# Altium schematic symbol library Inductors.SchLib: 6 symbols
Pins are listed as number, name and electrical type; pins without a type are passive.

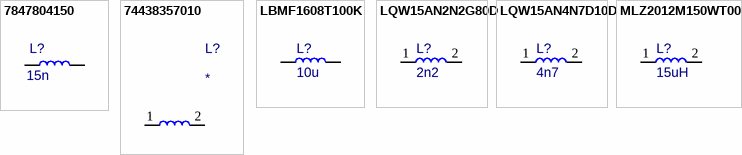
[diagram p0: symbols 7847804150 to MLZ2012M150WT000]

## 7847804150
designator L?, comment 15n
0402, 300mA, RF Inductors - SMD WE-MCI 15nH 5% 0.46Ohms Q-Factor=8 AEC-Q200; Manufacturer_Name: Wurth Elektronik; Manufacturer_Part_Number: 7847804150; ComponentLink1Description: Datasheet; ComponentLink1URL: https://www.we-online.com/components/products/datasheet/7847804150.pdf
footprint 7847804150 (Wuerth 0402 RF Inductors - SMD WE-MCI 15nH 0.46Ohms Q-Factor=8 AEC-Q200)
pins: 1, 2

## 74438357010
designator L?
Power Inductors - SMD WE-MAPI 1uH 7.4A DCR=13.5mOhms AEC-Q200; Manufacturer_Name: Wurth Elektronik; Manufacturer_Part_Number: 74438357010; Description: WE-MAPI SMT Power Inductor Size 4030; L = 1 H +/-20%; IR = 10.25 A; Isat = 12.5 A; RDC = 13.5 m; Datasheet Link: https://www.we-online.com/catalog/datasheet/74438357010.pdf; Height: 3.1mm; Mouser Part Number: 710-74438357010; Mouser Price/Stock: https://www.mouser.co.uk/ProductDetail/Wurth-Elektronik/74438357010?qs=AQlKX63v8RstGPuQmrueWg%3D%3D; Arrow Part Number: 74438357010; Arrow Price/Stock: null?utm_currency=USD&region=asia
footprint 74438357010 (Power Inductors - SMD WE-MAPI 1uH 7.4A DCR=13.5mOhms AEC-Q200)
pins: 1, 2

## LBMF1608T100K
designator L?, comment 10u
Power inductor  0603 10uH 468mOhmsTol 80mA; Manufacturer_Name: Taiyo Yuden; Manufacturer_Part_Number: LBMF1608T100K; Datasheet Link: https://www.mouser.de/datasheet/2/396/wound01_e-1509533.pdf; Height: 0.8; Mouser Part Number: 963-LBMF1608T100K; Mouser Price/Stock: https://www.mouser.co.uk/ProductDetail/Murata-Electronics/LQW15AN2N2G80D?qs=QzBtWTOodeXwqmhCVrS0ZQ%3D%3D; Arrow Part Number: LQW15AN2N2G80D; Arrow Price/Stock: https://www.arrow.com/en/products/lqw15an2n2g80d/murata-manufacturing
footprint LBMF1608T100K (TAIYO YUDEN 0603 footprint for power inductors)
pins: 1, 2

## LQW15AN2N2G80D
designator L?, comment 2n2
RF Inductors - SMD 2.2 NH 2%; Manufacturer_Name: Murata Electronics; Manufacturer_Part_Number: LQW15AN2N2G80D; Datasheet Link: https://psearch.en.murata.com/inductor/product/LQW15AN2N2G80%23.html; Height: 0.6mm; Mouser Part Number: 81-LQW15AN2N2G80D; Mouser Price/Stock: https://www.mouser.co.uk/ProductDetail/Murata-Electronics/LQW15AN2N2G80D?qs=QzBtWTOodeXwqmhCVrS0ZQ%3D%3D; Arrow Part Number: LQW15AN2N2G80D; Arrow Price/Stock: https://www.arrow.com/en/products/lqw15an2n2g80d/murata-manufacturing
footprint LQW15AN10NG80D
pins: 1, 2

## LQW15AN4N7D10D
designator L?, comment 4n7
RF Inductors - SMD 4.7 NH +-.5NH; Manufacturer_Name: Murata Electronics; Manufacturer_Part_Number: LQW15AN4N7D10D; Datasheet Link: https://www.mouser.de/datasheet/2/281/1/JELF243A_0051-1380923.pdf; Height: 0.6mm; Mouser Part Number: 81-LQW15AN4N7D10D; Mouser Price/Stock: https://www.mouser.co.uk/ProductDetail/Murata-Electronics/LQW15AN2N2G80D?qs=QzBtWTOodeXwqmhCVrS0ZQ%3D%3D; Arrow Part Number: LQW15AN2N2G80D; Arrow Price/Stock: https://www.arrow.com/en/products/lqw15an2n2g80d/murata-manufacturing
footprint LQW15AN10NG80D
pins: 1, 2

## MLZ2012M150WT000
designator L?, comment 15uH
Power Inductors - SMD 15 UH 20% shielded 250mA; Manufacturer_Name: TDK; Manufacturer_Part_Number: MLZ2012M150WT000; Datasheet Link: https://product.tdk.com/system/files/dam/doc/product/inductor/inductor/smd/catalog/inductor_commercial_decoupling_mlz2012_en.pdf; Height: 1.25mm; Mouser Part Number: 810-MLZ2012M150WT000; Mouser Price/Stock: https://www.mouser.co.uk/ProductDetail/Murata-Electronics/LQW15AN2N2G80D?qs=QzBtWTOodeXwqmhCVrS0ZQ%3D%3D; Arrow Part Number: LQW15AN2N2G80D; Arrow Price/Stock: https://www.arrow.com/en/products/lqw15an2n2g80d/murata-manufacturing
footprint INDUCTOR_0805 (Generic inductor (L) 0805)
pins: 1, 2